# Altium schematic symbol library AT24C512BN-SH25-B.SchLib: 1 symbol
Pins are listed as number, name and electrical type; pins without a type are passive.

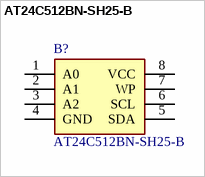
[diagram p0: symbol AT24C512BN-SH25-B]

## AT24C512BN-SH25-B
designator B?
Two-wire Serial EEPROM; Manufacturer_Name: Microchip; Geometry.Height: 1.75mm; Manufacturer_Part_Number: AT24C512BN-SH25-B; Mouser Part Number: 556-A24C512BNSH25-B; Mouser Price/Stock: https://www.mouser.com/Search/Refine.aspx?Keyword=556-A24C512BNSH25-B; Arrow Part Number: *; Arrow Price/Stock: *; Datasheet Link: https://datasheet.datasheetarchive.com/originals/distributors/Datasheets_SAMA/4105ab7231f9d8c0ae47044db4ac63a0.pdf
footprint SOIC127P600X175-8N
pins: 1 A0, 2 A1, 3 A2, 4 GND, 5 SDA, 6 SCL, 7 WP, 8 VCC